# Altium schematic symbol library AD8221ARMZ.SchLib: 1 symbol
Pins are listed as number, name and electrical type; pins without a type are passive.

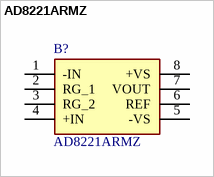
[diagram p0: symbol AD8221ARMZ]

## AD8221ARMZ
designator B?
Instrumentation Amplifiers Precision Instrumentation Amplifier; Manufacturer_Name: Analog Devices; Geometry.Height: 1.1mm; Mouser Part Number: 584-AD8221ARMZ; Mouser Price/Stock: https://www.mouser.co.uk/ProductDetail/Analog-Devices/AD8221ARMZ?qs=%2FtpEQrCGXCxTYonUPIPyhA%3D%3D; Manufacturer_Part_Number: AD8221ARMZ; Datasheet Link: https://componentsearchengine.com/Datasheets/2/AD8221ARMZ.pdf
footprint SOP65P490X110-8N
pins: 1 -IN, 2 RG_1, 3 RG_2, 4 +IN, 5 -VS, 6 REF, 7 VOUT, 8 +VS